# Altium footprint library SAMTEC_TSW-104-08-G-D-RA.PcbLib: 1 footprints
Each footprint in its own frame and in the unit in brackets; x right, y up, seen from the top. Pads: shape width x height; smd on the part's side, far side on the other; paste and mask are expansions set on the pad; w line width, h text height; cw(c..) or ccw(c..) is an arc to the next point about the centre after c.
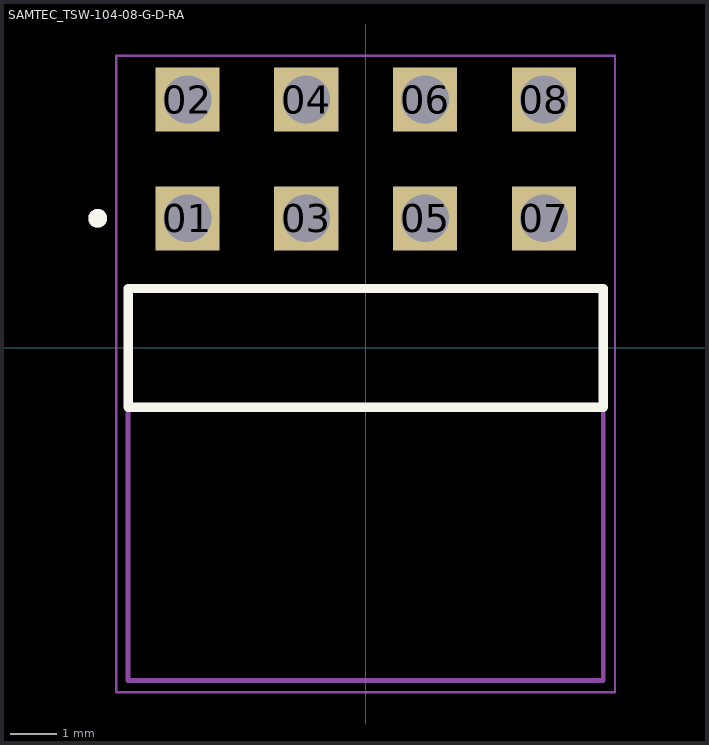
[diagram p0: the footprint, top view; thin cyan lines are the x and y axes]

## SAMTEC_TSW-104-08-G-D-RA [mm]
pads (8):
  rect 1.37x1.37 hole 1.02: 01(-3.81,2.77) 02(-3.81,5.31) 03(-1.27,2.77) 04(-1.27,5.31) 05(1.27,2.77) 06(1.27,5.31) 07(3.81,2.77) 08(3.81,5.31)
Top Overlay:
  circle w0.2: c-5.73,2.77 r0.1
  lines w0.2: -5.08,-1.27 -5.08,1.27 5.08,1.27 5.08,-1.27 -5.08,-1.27
Mechanical 13:
  circle w0.2: c-5.73,2.77 r0.1
  lines w0.1: -5.08,-1.27 -5.08,1.27 5.08,1.27 5.08,-1.27 ; -5.08,-1.27 5.08,-1.27 ; -5.08,-1.27 -5.08,-7.11 5.08,-7.11 5.08,-1.27
Mechanical 15:
  lines w0.05: -5.33,-7.36 -5.33,6.245 5.33,6.245 5.33,-7.36 -5.33,-7.36
3D body "TSW-104-08-G-D-RA.stp": height 5.59, standoff -2.26, extent -5.08,-7.112 5.08,5.651